# Altium footprint library Package_DFN_QFN.PcbLib: 735 footprints (part 18 of 46)
Each footprint in its own frame and in the unit in brackets; x right, y up, seen from the top. Pads: shape width x height; smd on the part's side, far side on the other; paste and mask are expansions set on the pad; w line width, h text height; cw(c..) or ccw(c..) is an arc to the next point about the centre after c.
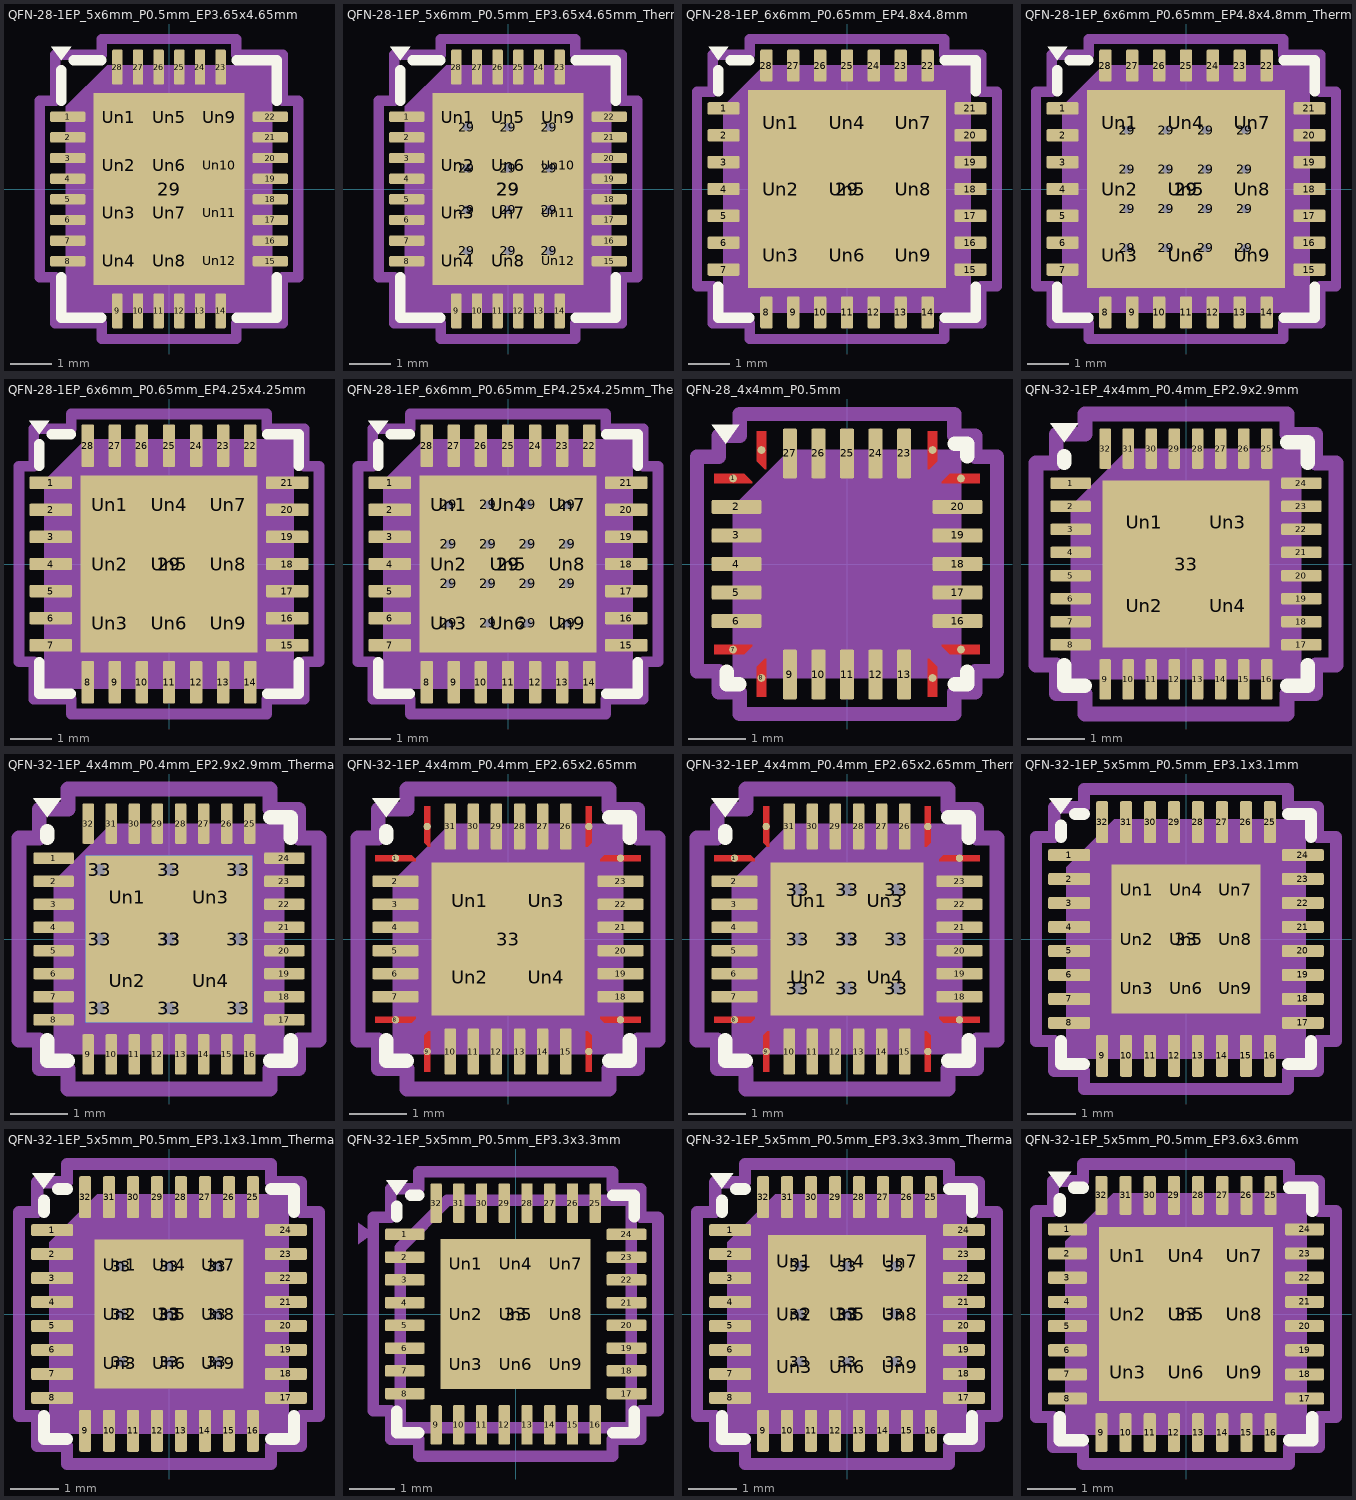
[diagram p17: the footprints below, top view; thin cyan lines are the x and y axes]

## QFN-28-1EP_5x6mm_P0.5mm_EP3.65x4.65mm [mm] "QFN-28-1EP_5x6mm_P0.5mm_EP3.65x4.65mm"
pads (41):
  rrect25% 0.85x0.25 smd: 1(-2.45,1.75) 2(-2.45,1.25) 3(-2.45,0.75) 4(-2.45,0.25) 5(-2.45,-0.25) 6(-2.45,-0.75) 7(-2.45,-1.25) 8(-2.45,-1.75) 15(2.45,-1.75) 16(2.45,-1.25) 17(2.45,-0.75) 18(2.45,-0.25) 19(2.45,0.25) 20(2.45,0.75) 21(2.45,1.25) 22(2.45,1.75)
  rrect25% 0.25x0.85 smd: 9(-1.25,-2.95) 10(-0.75,-2.95) 11(-0.25,-2.95) 12(0.25,-2.95) 13(0.75,-2.95) 14(1.25,-2.95) 23(1.25,2.95) 24(0.75,2.95) 25(0.25,2.95) 26(-0.25,2.95) 27(-0.75,2.95) 28(-1.25,2.95)
  rect 3.65x4.65 smd: 29(0,0)
  rrect25% 0.98x0.94 on Top Paste: Un1(-1.22,1.74) Un2(-1.22,0.58) Un3(-1.22,-0.58) Un4(-1.22,-1.74) Un5(0,1.74) Un6(0,0.58) Un7(0,-0.58) Un8(0,-1.74) Un9(1.22,1.74) Un10(1.22,0.58) Un11(1.22,-0.58) Un12(1.22,-1.74)
F.SilkS:
  region: -2.61,3.11 -2.85,3.44 -2.37,3.44
  lines w0.254: -2.61,-2.135 -2.61,-3.11 -1.635,-3.11 ; -2.61,2.135 -2.61,2.87 ; -2.31,3.11 -1.635,3.11 ; 1.635,-3.11 2.61,-3.11 2.61,-2.135 ; 1.635,3.11 2.61,3.11 2.61,2.135
Top Component Center:
  lines w0.127: -0.127,0 0.127,0 -0.127,0 ; 0,-0.127 0,0.127 0,-0.127
Top Assembly:
  region: 2.5,-3 -2.5,-3 -2.5,2 -1.5,3 2.5,3
Top Courtyard:
  lines w0.254: -3.13,-2.13 -2.75,-2.13 -2.75,-3.25 -1.63,-3.25 -1.63,-3.63 1.63,-3.63 1.63,-3.25 2.75,-3.25 2.75,-2.13 3.13,-2.13 3.13,2.13 2.75,2.13 2.75,3.25 1.63,3.25 1.63,3.63 -1.63,3.63 -1.63,3.25 -2.75,3.25 -2.75,2.13 -3.13,2.13 -3.13,-2.13
Top Designator:
  text ".Designator" at -3.43,-0.344 h1.52
3D body "QFN-28-1EP_5x6mm_P0.5mm_EP3.65x4.65mm.step": height 0.77, standoff 0, extent -2.5,-3 2.5,3

## QFN-28-1EP_5x6mm_P0.5mm_EP3.65x4.65mm_ThermalVias [mm] "QFN-28-1EP_5x6mm_P0.5mm_EP3.65x4.65mm_ThermalVias"
pads (54):
  rrect25% 0.85x0.25 smd: 1(-2.45,1.75) 2(-2.45,1.25) 3(-2.45,0.75) 4(-2.45,0.25) 5(-2.45,-0.25) 6(-2.45,-0.75) 7(-2.45,-1.25) 8(-2.45,-1.75) 15(2.45,-1.75) 16(2.45,-1.25) 17(2.45,-0.75) 18(2.45,-0.25) 19(2.45,0.25) 20(2.45,0.75) 21(2.45,1.25) 22(2.45,1.75)
  rrect25% 0.25x0.85 smd: 9(-1.25,-2.95) 10(-0.75,-2.95) 11(-0.25,-2.95) 12(0.25,-2.95) 13(0.75,-2.95) 14(1.25,-2.95) 23(1.25,2.95) 24(0.75,2.95) 25(0.25,2.95) 26(-0.25,2.95) 27(-0.75,2.95) 28(-1.25,2.95)
  round 0.5 hole 0.2: 29(-1,-1.5) 29(-1,-0.5) 29(-1,0.5) 29(-1,1.5) 29(0,-1.5) 29(0,-0.5) 29(0,0.5) 29(0,1.5) 29(1,-1.5) 29(1,-0.5) 29(1,0.5) 29(1,1.5)
  rect 3.65x4.65 smd: 29(0,0)
  rect 2.5x3.5 smd far side: 29(0,0)
  rrect25% 0.98x0.94 on Top Paste: Un1(-1.22,1.74) Un2(-1.22,0.58) Un3(-1.22,-0.58) Un4(-1.22,-1.74) Un5(0,1.74) Un6(0,0.58) Un7(0,-0.58) Un8(0,-1.74) Un9(1.22,1.74) Un10(1.22,0.58) Un11(1.22,-0.58) Un12(1.22,-1.74)
F.SilkS:
  region: -2.61,3.11 -2.85,3.44 -2.37,3.44
  lines w0.254: -2.61,-2.135 -2.61,-3.11 -1.635,-3.11 ; -2.61,2.135 -2.61,2.87 ; -2.31,3.11 -1.635,3.11 ; 1.635,-3.11 2.61,-3.11 2.61,-2.135 ; 1.635,3.11 2.61,3.11 2.61,2.135
Top Component Center:
  lines w0.127: -0.127,0 0.127,0 -0.127,0 ; 0,-0.127 0,0.127 0,-0.127
Top Assembly:
  region: 2.5,-3 -2.5,-3 -2.5,2 -1.5,3 2.5,3
Top Courtyard:
  lines w0.254: -3.13,-2.13 -2.75,-2.13 -2.75,-3.25 -1.63,-3.25 -1.63,-3.63 1.63,-3.63 1.63,-3.25 2.75,-3.25 2.75,-2.13 3.13,-2.13 3.13,2.13 2.75,2.13 2.75,3.25 1.63,3.25 1.63,3.63 -1.63,3.63 -1.63,3.25 -2.75,3.25 -2.75,2.13 -3.13,2.13 -3.13,-2.13
Top Designator:
  text ".Designator" at -3.43,-0.344 h1.52
3D body "QFN-28-1EP_5x6mm_P0.5mm_EP3.65x4.65mm.step": height 0.77, standoff 0, extent -2.5,-3 2.5,3

## QFN-28-1EP_6x6mm_P0.65mm_EP4.8x4.8mm [mm] "QFN-28-1EP_6x6mm_P0.65mm_EP4.8x4.8mm"
pads (38):
  rrect25% 0.775x0.3 smd: 1(-2.987,1.95) 2(-2.987,1.3) 3(-2.987,0.65) 4(-2.987,0) 5(-2.987,-0.65) 6(-2.987,-1.3) 7(-2.987,-1.95) 15(2.987,-1.95) 16(2.987,-1.3) 17(2.987,-0.65) 18(2.987,0) 19(2.987,0.65) 20(2.987,1.3) 21(2.987,1.95)
  rrect25% 0.3x0.775 smd: 8(-1.95,-2.987) 9(-1.3,-2.987) 10(-0.65,-2.987) 11(0,-2.987) 12(0.65,-2.987) 13(1.3,-2.987) 14(1.95,-2.987) 22(1.95,2.987) 23(1.3,2.987) 24(0.65,2.987) 25(0,2.987) 26(-0.65,2.987) 27(-1.3,2.987) 28(-1.95,2.987)
  rect 4.8x4.8 smd: 29(0,0)
  rrect19% 1.29x1.29 on Top Paste: Un1(-1.6,1.6) Un2(-1.6,0) Un3(-1.6,-1.6) Un4(0,1.6) Un5(0,0) Un6(0,-1.6) Un7(1.6,1.6) Un8(1.6,0) Un9(1.6,-1.6)
F.SilkS:
  region: -3.11,3.11 -3.35,3.44 -2.87,3.44
  lines w0.254: -3.11,-2.36 -3.11,-3.11 -2.36,-3.11 ; -3.11,2.36 -3.11,2.87 ; -2.81,3.11 -2.36,3.11 ; 2.36,-3.11 3.11,-3.11 3.11,-2.36 ; 2.36,3.11 3.11,3.11 3.11,2.36
Top Component Center:
  lines w0.127: -0.127,0 0.127,0 -0.127,0 ; 0,-0.127 0,0.127 0,-0.127
Top Assembly:
  region: 3,-3 -3,-3 -3,2 -2,3 3,3
Top Courtyard:
  lines w0.254: -3.63,-2.35 -3.25,-2.35 -3.25,-3.25 -2.35,-3.25 -2.35,-3.63 2.35,-3.63 2.35,-3.25 3.25,-3.25 3.25,-2.35 3.63,-2.35 3.63,2.35 3.25,2.35 3.25,3.25 2.35,3.25 2.35,3.63 -2.35,3.63 -2.35,3.25 -3.25,3.25 -3.25,2.35 -3.63,2.35 -3.63,-2.35
Top Designator:
  text ".Designator" at -3.43,-0.344 h1.52
3D body "QFN-28-1EP_6x6mm_P0.65mm_EP4.8x4.8mm.step": height 0.93, standoff 0, extent -3,-3 3,3

## QFN-28-1EP_6x6mm_P0.65mm_EP4.8x4.8mm_ThermalVias [mm] "QFN-28-1EP_6x6mm_P0.65mm_EP4.8x4.8mm_ThermalVias"
pads (55):
  rrect25% 0.775x0.3 smd: 1(-2.987,1.95) 2(-2.987,1.3) 3(-2.987,0.65) 4(-2.987,0) 5(-2.987,-0.65) 6(-2.987,-1.3) 7(-2.987,-1.95) 15(2.987,-1.95) 16(2.987,-1.3) 17(2.987,-0.65) 18(2.987,0) 19(2.987,0.65) 20(2.987,1.3) 21(2.987,1.95)
  rrect25% 0.3x0.775 smd: 8(-1.95,-2.987) 9(-1.3,-2.987) 10(-0.65,-2.987) 11(0,-2.987) 12(0.65,-2.987) 13(1.3,-2.987) 14(1.95,-2.987) 22(1.95,2.987) 23(1.3,2.987) 24(0.65,2.987) 25(0,2.987) 26(-0.65,2.987) 27(-1.3,2.987) 28(-1.95,2.987)
  round 0.5 hole 0.2: 29(-1.425,-1.425) 29(-1.425,-0.475) 29(-1.425,0.475) 29(-1.425,1.425) 29(-0.475,-1.425) 29(-0.475,-0.475) 29(-0.475,0.475) 29(-0.475,1.425) 29(0.475,-1.425) 29(0.475,-0.475) 29(0.475,0.475) 29(0.475,1.425) 29(1.425,-1.425) 29(1.425,-0.475) 29(1.425,0.475) 29(1.425,1.425)
  rect 4.8x4.8 smd: 29(0,0)
  rect 3.35x3.35 smd far side: 29(0,0)
  rrect19% 1.29x1.29 on Top Paste: Un1(-1.6,1.6) Un2(-1.6,0) Un3(-1.6,-1.6) Un4(0,1.6) Un5(0,0) Un6(0,-1.6) Un7(1.6,1.6) Un8(1.6,0) Un9(1.6,-1.6)
F.SilkS:
  region: -3.11,3.11 -3.35,3.44 -2.87,3.44
  lines w0.254: -3.11,-2.36 -3.11,-3.11 -2.36,-3.11 ; -3.11,2.36 -3.11,2.87 ; -2.81,3.11 -2.36,3.11 ; 2.36,-3.11 3.11,-3.11 3.11,-2.36 ; 2.36,3.11 3.11,3.11 3.11,2.36
Top Component Center:
  lines w0.127: -0.127,0 0.127,0 -0.127,0 ; 0,-0.127 0,0.127 0,-0.127
Top Assembly:
  region: 3,-3 -3,-3 -3,2 -2,3 3,3
Top Courtyard:
  lines w0.254: -3.63,-2.35 -3.25,-2.35 -3.25,-3.25 -2.35,-3.25 -2.35,-3.63 2.35,-3.63 2.35,-3.25 3.25,-3.25 3.25,-2.35 3.63,-2.35 3.63,2.35 3.25,2.35 3.25,3.25 2.35,3.25 2.35,3.63 -2.35,3.63 -2.35,3.25 -3.25,3.25 -3.25,2.35 -3.63,2.35 -3.63,-2.35
Top Designator:
  text ".Designator" at -3.43,-0.344 h1.52
3D body "QFN-28-1EP_6x6mm_P0.65mm_EP4.8x4.8mm.step": height 0.93, standoff 0, extent -3,-3 3,3

## QFN-28-1EP_6x6mm_P0.65mm_EP4.25x4.25mm [mm] "QFN-28-1EP_6x6mm_P0.65mm_EP4.25x4.25mm"
pads (38):
  rrect25% 1.025x0.3 smd: 1(-2.838,1.95) 2(-2.838,1.3) 3(-2.838,0.65) 4(-2.838,0) 5(-2.838,-0.65) 6(-2.838,-1.3) 7(-2.838,-1.95) 15(2.838,-1.95) 16(2.838,-1.3) 17(2.838,-0.65) 18(2.838,0) 19(2.838,0.65) 20(2.838,1.3) 21(2.838,1.95)
  rrect25% 0.3x1.025 smd: 8(-1.95,-2.838) 9(-1.3,-2.838) 10(-0.65,-2.838) 11(0,-2.838) 12(0.65,-2.838) 13(1.3,-2.838) 14(1.95,-2.838) 22(1.95,2.838) 23(1.3,2.838) 24(0.65,2.838) 25(0,2.838) 26(-0.65,2.838) 27(-1.3,2.838) 28(-1.95,2.838)
  rect 4.25x4.25 smd: 29(0,0)
  rrect22% 1.14x1.14 on Top Paste: Un1(-1.42,1.42) Un2(-1.42,0) Un3(-1.42,-1.42) Un4(0,1.42) Un5(0,0) Un6(0,-1.42) Un7(1.42,1.42) Un8(1.42,0) Un9(1.42,-1.42)
F.SilkS:
  region: -3.11,3.11 -3.35,3.44 -2.87,3.44
  lines w0.254: -3.11,-2.36 -3.11,-3.11 -2.36,-3.11 ; -3.11,2.36 -3.11,2.87 ; -2.81,3.11 -2.36,3.11 ; 2.36,-3.11 3.11,-3.11 3.11,-2.36 ; 2.36,3.11 3.11,3.11 3.11,2.36
Top Component Center:
  lines w0.127: -0.127,0 0.127,0 -0.127,0 ; 0,-0.127 0,0.127 0,-0.127
Top Assembly:
  region: 3,-3 -3,-3 -3,2 -2,3 3,3
Top Courtyard:
  lines w0.254: -3.6,-2.35 -3.6,2.35 -3.25,2.35 -3.25,3.25 -2.35,3.25 -2.35,3.6 2.35,3.6 2.35,3.25 3.25,3.25 3.25,2.35 3.6,2.35 3.6,-2.35 3.25,-2.35 3.25,-3.25 2.35,-3.25 2.35,-3.6 -2.35,-3.6 -2.35,-3.25 -3.25,-3.25 -3.25,-2.35 -3.6,-2.35
Top Designator:
  text ".Designator" at -3.43,-0.344 h1.52
3D body "QFN-28-1EP_6x6mm_P0.65mm_EP4.25x4.25mm.step": height 0.92, standoff 0, extent -3,-3 3,3

## QFN-28-1EP_6x6mm_P0.65mm_EP4.25x4.25mm_ThermalVias [mm] "QFN-28-1EP_6x6mm_P0.65mm_EP4.25x4.25mm_ThermalVias"
pads (55):
  rrect25% 1.025x0.3 smd: 1(-2.838,1.95) 2(-2.838,1.3) 3(-2.838,0.65) 4(-2.838,0) 5(-2.838,-0.65) 6(-2.838,-1.3) 7(-2.838,-1.95) 15(2.838,-1.95) 16(2.838,-1.3) 17(2.838,-0.65) 18(2.838,0) 19(2.838,0.65) 20(2.838,1.3) 21(2.838,1.95)
  rrect25% 0.3x1.025 smd: 8(-1.95,-2.838) 9(-1.3,-2.838) 10(-0.65,-2.838) 11(0,-2.838) 12(0.65,-2.838) 13(1.3,-2.838) 14(1.95,-2.838) 22(1.95,2.838) 23(1.3,2.838) 24(0.65,2.838) 25(0,2.838) 26(-0.65,2.838) 27(-1.3,2.838) 28(-1.95,2.838)
  round 0.5 hole 0.2: 29(-1.425,-1.425) 29(-1.425,-0.475) 29(-1.425,0.475) 29(-1.425,1.425) 29(-0.475,-1.425) 29(-0.475,-0.475) 29(-0.475,0.475) 29(-0.475,1.425) 29(0.475,-1.425) 29(0.475,-0.475) 29(0.475,0.475) 29(0.475,1.425) 29(1.425,-1.425) 29(1.425,-0.475) 29(1.425,0.475) 29(1.425,1.425)
  rect 4.25x4.25 smd: 29(0,0)
  rect 3.35x3.35 smd far side: 29(0,0)
  rrect22% 1.14x1.14 on Top Paste: Un1(-1.42,1.42) Un2(-1.42,0) Un3(-1.42,-1.42) Un4(0,1.42) Un5(0,0) Un6(0,-1.42) Un7(1.42,1.42) Un8(1.42,0) Un9(1.42,-1.42)
F.SilkS:
  region: -3.11,3.11 -3.35,3.44 -2.87,3.44
  lines w0.254: -3.11,-2.36 -3.11,-3.11 -2.36,-3.11 ; -3.11,2.36 -3.11,2.87 ; -2.81,3.11 -2.36,3.11 ; 2.36,-3.11 3.11,-3.11 3.11,-2.36 ; 2.36,3.11 3.11,3.11 3.11,2.36
Top Component Center:
  lines w0.127: -0.127,0 0.127,0 -0.127,0 ; 0,-0.127 0,0.127 0,-0.127
Top Assembly:
  region: 3,-3 -3,-3 -3,2 -2,3 3,3
Top Courtyard:
  lines w0.254: -3.6,-2.35 -3.25,-2.35 -3.25,-3.25 -2.35,-3.25 -2.35,-3.6 2.35,-3.6 2.35,-3.25 3.25,-3.25 3.25,-2.35 3.6,-2.35 3.6,2.35 3.25,2.35 3.25,3.25 2.35,3.25 2.35,3.6 -2.35,3.6 -2.35,3.25 -3.25,3.25 -3.25,2.35 -3.6,2.35 -3.6,-2.35
Top Designator:
  text ".Designator" at -3.43,-0.344 h1.52
3D body "QFN-28-1EP_6x6mm_P0.65mm_EP4.25x4.25mm.step": height 0.92, standoff 0, extent -3,-3 3,3

## QFN-28_4x4mm_P0.5mm [mm] "QFN-28_4x4mm_P0.5mm"
pads (28):
  round 0.137 smd: 1(-1.997,1.5) 7(-1.997,-1.5) 8(-1.5,-1.997) 14(1.5,-1.997) 15(1.997,-1.5) 21(1.997,1.5) 22(1.5,1.997) 28(-1.5,1.997)
  rrect25% 0.875x0.25 smd: 2(-1.937,1) 3(-1.937,0.5) 4(-1.937,0) 5(-1.937,-0.5) 6(-1.937,-1) 16(1.937,-1) 17(1.937,-0.5) 18(1.937,0) 19(1.937,0.5) 20(1.937,1)
  rrect25% 0.25x0.875 smd: 9(-1,-1.937) 10(-0.5,-1.937) 11(0,-1.937) 12(0.5,-1.937) 13(1,-1.937) 23(1,1.937) 24(0.5,1.937) 25(0,1.937) 26(-0.5,1.937) 27(-1,1.937)
F.Cu:
  region: -1.665,1.446 -1.665,1.42 -2.33,1.42 -2.33,1.58 -1.799,1.58
  region: -1.665,-1.446 -1.799,-1.58 -2.33,-1.58 -2.33,-1.42 -1.665,-1.42
  region: -1.42,-2.33 -1.58,-2.33 -1.58,-1.799 -1.446,-1.665 -1.42,-1.665
  region: 1.58,-1.799 1.58,-2.33 1.42,-2.33 1.42,-1.665 1.446,-1.665
  region: 2.33,-1.58 1.799,-1.58 1.665,-1.446 1.665,-1.42 2.33,-1.42
  region: 2.33,1.42 1.665,1.42 1.665,1.446 1.799,1.58 2.33,1.58
  region: 1.58,1.799 1.446,1.665 1.42,1.665 1.42,2.33 1.58,2.33
  region: -1.42,1.665 -1.446,1.665 -1.58,1.799 -1.58,2.33 -1.42,2.33
F.SilkS:
  region: -2.13,2.11 -2.37,2.44 -1.89,2.44
  lines w0.254: -2.11,-1.885 -2.11,-2.11 -1.885,-2.11 ; 1.885,-2.11 2.11,-2.11 2.11,-1.885 ; 1.885,2.11 2.11,2.11 2.11,1.885
F.Paste:
  region: -1.665,1.446 -1.665,1.42 -2.33,1.42 -2.33,1.58 -1.799,1.58
  region: -1.665,-1.446 -1.799,-1.58 -2.33,-1.58 -2.33,-1.42 -1.665,-1.42
  region: -1.42,-2.33 -1.58,-2.33 -1.58,-1.799 -1.446,-1.665 -1.42,-1.665
  region: 1.58,-1.799 1.58,-2.33 1.42,-2.33 1.42,-1.665 1.446,-1.665
  region: 2.33,-1.58 1.799,-1.58 1.665,-1.446 1.665,-1.42 2.33,-1.42
  region: 2.33,1.42 1.665,1.42 1.665,1.446 1.799,1.58 2.33,1.58
  region: 1.58,1.799 1.446,1.665 1.42,1.665 1.42,2.33 1.58,2.33
  region: -1.42,1.665 -1.446,1.665 -1.58,1.799 -1.58,2.33 -1.42,2.33
F.Mask:
  region: -1.665,1.446 -1.665,1.42 -2.33,1.42 -2.33,1.58 -1.799,1.58
  region: -1.665,-1.446 -1.799,-1.58 -2.33,-1.58 -2.33,-1.42 -1.665,-1.42
  region: -1.42,-2.33 -1.58,-2.33 -1.58,-1.799 -1.446,-1.665 -1.42,-1.665
  region: 1.58,-1.799 1.58,-2.33 1.42,-2.33 1.42,-1.665 1.446,-1.665
  region: 2.33,-1.58 1.799,-1.58 1.665,-1.446 1.665,-1.42 2.33,-1.42
  region: 2.33,1.42 1.665,1.42 1.665,1.446 1.799,1.58 2.33,1.58
  region: 1.58,1.799 1.446,1.665 1.42,1.665 1.42,2.33 1.58,2.33
  region: -1.42,1.665 -1.446,1.665 -1.58,1.799 -1.58,2.33 -1.42,2.33
Top Component Center:
  lines w0.127: -0.127,0 0.127,0 -0.127,0 ; 0,-0.127 0,0.127 0,-0.127
Top Assembly:
  region: 2,-2 -2,-2 -2,1 -1,2 2,2
Top Courtyard:
  lines w0.254: -2.63,-1.88 -2.63,1.88 -2.25,1.88 -2.25,2.25 -1.88,2.25 -1.88,2.63 1.88,2.63 1.88,2.25 2.25,2.25 2.25,1.88 2.63,1.88 2.63,-1.88 2.25,-1.88 2.25,-2.25 1.88,-2.25 1.88,-2.63 -1.88,-2.63 -1.88,-2.25 -2.25,-2.25 -2.25,-1.88 -2.63,-1.88
Top Designator:
  text ".Designator" at -3.43,-0.344 h1.52

## QFN-32-1EP_4x4mm_P0.4mm_EP2.9x2.9mm [mm] "QFN-32-1EP_4x4mm_P0.4mm_EP2.9x2.9mm"
pads (37):
  rrect25% 0.7x0.2 smd: 1(-2,1.4) 2(-2,1) 3(-2,0.6) 4(-2,0.2) 5(-2,-0.2) 6(-2,-0.6) 7(-2,-1) 8(-2,-1.4) 17(2,-1.4) 18(2,-1) 19(2,-0.6) 20(2,-0.2) 21(2,0.2) 22(2,0.6) 23(2,1) 24(2,1.4)
  rrect25% 0.2x0.7 smd: 9(-1.4,-2) 10(-1,-2) 11(-0.6,-2) 12(-0.2,-2) 13(0.2,-2) 14(0.6,-2) 15(1,-2) 16(1.4,-2) 25(1.4,2) 26(1,2) 27(0.6,2) 28(0.2,2) 29(-0.2,2) 30(-0.6,2) 31(-1,2) 32(-1.4,2)
  rect 2.9x2.9 smd: 33(0,0)
  rrect21% 1.17x1.17 on Top Paste: Un1(-0.725,0.725) Un2(-0.725,-0.725) Un3(0.725,0.725) Un4(0.725,-0.725)
F.SilkS:
  region: -2.11,2.11 -2.35,2.44 -1.87,2.44
  lines w0.254: -2.11,-1.76 -2.11,-2.11 -1.76,-2.11 ; -2.11,1.76 -2.11,1.87 ; 1.76,-2.11 2.11,-2.11 2.11,-1.76 ; 1.76,2.11 2.11,2.11 2.11,1.76
Top Component Center:
  lines w0.127: -0.127,0 0.127,0 -0.127,0 ; 0,-0.127 0,0.127 0,-0.127
Top Assembly:
  region: 2,-2 -2,-2 -2,1 -1,2 2,2
Top Courtyard:
  lines w0.254: -2.6,-1.75 -2.6,1.75 -2.25,1.75 -2.25,2.25 -1.75,2.25 -1.75,2.6 1.75,2.6 1.75,2.25 2.25,2.25 2.25,1.75 2.6,1.75 2.6,-1.75 2.25,-1.75 2.25,-2.25 1.75,-2.25 1.75,-2.6 -1.75,-2.6 -1.75,-2.25 -2.25,-2.25 -2.25,-1.75 -2.6,-1.75
Top Designator:
  text ".Designator" at -3.43,-0.344 h1.52
3D body "QFN-32-1EP_4x4mm_P0.4mm_EP2.65x2.65mm.step": height 0.92, standoff 0, extent -2,-2 2,2

## QFN-32-1EP_4x4mm_P0.4mm_EP2.9x2.9mm_ThermalVias [mm] "QFN-32-1EP_4x4mm_P0.4mm_EP2.9x2.9mm_ThermalVias"
pads (47):
  rrect25% 0.7x0.2 smd: 1(-2,1.4) 2(-2,1) 3(-2,0.6) 4(-2,0.2) 5(-2,-0.2) 6(-2,-0.6) 7(-2,-1) 8(-2,-1.4) 17(2,-1.4) 18(2,-1) 19(2,-0.6) 20(2,-0.2) 21(2,0.2) 22(2,0.6) 23(2,1) 24(2,1.4)
  rrect25% 0.2x0.7 smd: 9(-1.4,-2) 10(-1,-2) 11(-0.6,-2) 12(-0.2,-2) 13(0.2,-2) 14(0.6,-2) 15(1,-2) 16(1.4,-2) 25(1.4,2) 26(1,2) 27(0.6,2) 28(0.2,2) 29(-0.2,2) 30(-0.6,2) 31(-1,2) 32(-1.4,2)
  round 0.5 hole 0.2: 33(-1.2,-1.2) 33(-1.2,0) 33(-1.2,1.2) 33(0,-1.2) 33(0,0) 33(0,1.2) 33(1.2,-1.2) 33(1.2,0) 33(1.2,1.2)
  rect 2.9x2.9 smd: 33(0,0)
  rect 2.9x2.9 smd far side: 33(0,0)
  rrect20% 1.26x1.26 on Top Paste: Un1(-0.725,0.725) Un2(-0.725,-0.725) Un3(0.725,0.725) Un4(0.725,-0.725)
F.SilkS:
  region: -2.11,2.11 -2.35,2.44 -1.87,2.44
  lines w0.254: -2.11,-1.76 -2.11,-2.11 -1.76,-2.11 ; -2.11,1.76 -2.11,1.87 ; 1.76,-2.11 2.11,-2.11 2.11,-1.76 ; 1.76,2.11 2.11,2.11 2.11,1.76
Top Component Center:
  lines w0.127: -0.127,0 0.127,0 -0.127,0 ; 0,-0.127 0,0.127 0,-0.127
Top Assembly:
  region: 2,-2 -2,-2 -2,1 -1,2 2,2
Top Courtyard:
  lines w0.254: -2.6,-1.75 -2.6,1.75 -2.25,1.75 -2.25,2.25 -1.75,2.25 -1.75,2.6 1.75,2.6 1.75,2.25 2.25,2.25 2.25,1.75 2.6,1.75 2.6,-1.75 2.25,-1.75 2.25,-2.25 1.75,-2.25 1.75,-2.6 -1.75,-2.6 -1.75,-2.25 -2.25,-2.25 -2.25,-1.75 -2.6,-1.75
Top Designator:
  text ".Designator" at -3.43,-0.344 h1.52
3D body "QFN-32-1EP_4x4mm_P0.4mm_EP2.65x2.65mm.step": height 0.92, standoff 0, extent -2,-2 2,2

## QFN-32-1EP_4x4mm_P0.4mm_EP2.65x2.65mm [mm] "QFN-32-1EP_4x4mm_P0.4mm_EP2.65x2.65mm"
pads (37):
  round 0.129 smd: 1(-1.95,1.4) 8(-1.95,-1.4) 9(-1.4,-1.95) 16(1.4,-1.95) 17(1.95,-1.4) 24(1.95,1.4) 25(1.4,1.95) 32(-1.4,1.95)
  rrect25% 0.8x0.2 smd: 2(-1.95,1) 3(-1.95,0.6) 4(-1.95,0.2) 5(-1.95,-0.2) 6(-1.95,-0.6) 7(-1.95,-1) 18(1.95,-1) 19(1.95,-0.6) 20(1.95,-0.2) 21(1.95,0.2) 22(1.95,0.6) 23(1.95,1)
  rrect25% 0.2x0.8 smd: 10(-1,-1.95) 11(-0.6,-1.95) 12(-0.2,-1.95) 13(0.2,-1.95) 14(0.6,-1.95) 15(1,-1.95) 26(1,1.95) 27(0.6,1.95) 28(0.2,1.95) 29(-0.2,1.95) 30(-0.6,1.95) 31(-1,1.95)
  rect 2.65x2.65 smd: 33(0,0)
  rrect23% 1.07x1.07 on Top Paste: Un1(-0.66,0.66) Un2(-0.66,-0.66) Un3(0.66,0.66) Un4(0.66,-0.66)
F.Cu:
  region: -1.6,1.379 -1.6,1.35 -2.3,1.35 -2.3,1.45 -1.671,1.45
  region: -1.6,-1.379 -1.671,-1.45 -2.3,-1.45 -2.3,-1.35 -1.6,-1.35
  region: -1.35,-2.3 -1.45,-2.3 -1.45,-1.671 -1.379,-1.6 -1.35,-1.6
  region: 1.45,-1.671 1.45,-2.3 1.35,-2.3 1.35,-1.6 1.379,-1.6
  region: 2.3,-1.45 1.671,-1.45 1.6,-1.379 1.6,-1.35 2.3,-1.35
  region: 2.3,1.35 1.6,1.35 1.6,1.379 1.671,1.45 2.3,1.45
  region: 1.45,1.671 1.379,1.6 1.35,1.6 1.35,2.3 1.45,2.3
  region: -1.35,1.6 -1.379,1.6 -1.45,1.671 -1.45,2.3 -1.35,2.3
F.SilkS:
  region: -2.11,2.11 -2.35,2.44 -1.87,2.44
  lines w0.254: -2.11,-1.76 -2.11,-2.11 -1.76,-2.11 ; -2.11,1.76 -2.11,1.87 ; 1.76,-2.11 2.11,-2.11 2.11,-1.76 ; 1.76,2.11 2.11,2.11 2.11,1.76
F.Paste:
  region: -1.6,1.379 -1.6,1.35 -2.3,1.35 -2.3,1.45 -1.671,1.45
  region: -1.6,-1.379 -1.671,-1.45 -2.3,-1.45 -2.3,-1.35 -1.6,-1.35
  region: -1.35,-2.3 -1.45,-2.3 -1.45,-1.671 -1.379,-1.6 -1.35,-1.6
  region: 1.45,-1.671 1.45,-2.3 1.35,-2.3 1.35,-1.6 1.379,-1.6
  region: 2.3,-1.45 1.671,-1.45 1.6,-1.379 1.6,-1.35 2.3,-1.35
  region: 2.3,1.35 1.6,1.35 1.6,1.379 1.671,1.45 2.3,1.45
  region: 1.45,1.671 1.379,1.6 1.35,1.6 1.35,2.3 1.45,2.3
  region: -1.35,1.6 -1.379,1.6 -1.45,1.671 -1.45,2.3 -1.35,2.3
F.Mask:
  region: -1.6,1.379 -1.6,1.35 -2.3,1.35 -2.3,1.45 -1.671,1.45
  region: -1.6,-1.379 -1.671,-1.45 -2.3,-1.45 -2.3,-1.35 -1.6,-1.35
  region: -1.35,-2.3 -1.45,-2.3 -1.45,-1.671 -1.379,-1.6 -1.35,-1.6
  region: 1.45,-1.671 1.45,-2.3 1.35,-2.3 1.35,-1.6 1.379,-1.6
  region: 2.3,-1.45 1.671,-1.45 1.6,-1.379 1.6,-1.35 2.3,-1.35
  region: 2.3,1.35 1.6,1.35 1.6,1.379 1.671,1.45 2.3,1.45
  region: 1.45,1.671 1.379,1.6 1.35,1.6 1.35,2.3 1.45,2.3
  region: -1.35,1.6 -1.379,1.6 -1.45,1.671 -1.45,2.3 -1.35,2.3
Top Component Center:
  lines w0.127: -0.127,0 0.127,0 -0.127,0 ; 0,-0.127 0,0.127 0,-0.127
Top Assembly:
  region: 2,-2 -2,-2 -2,1 -1,2 2,2
Top Courtyard:
  lines w0.254: -2.6,-1.75 -2.6,1.75 -2.25,1.75 -2.25,2.25 -1.75,2.25 -1.75,2.6 1.75,2.6 1.75,2.25 2.25,2.25 2.25,1.75 2.6,1.75 2.6,-1.75 2.25,-1.75 2.25,-2.25 1.75,-2.25 1.75,-2.6 -1.75,-2.6 -1.75,-2.25 -2.25,-2.25 -2.25,-1.75 -2.6,-1.75
Top Designator:
  text ".Designator" at -3.43,-0.344 h1.52
3D body "QFN-32-1EP_4x4mm_P0.4mm_EP2.65x2.65mm.step": height 0.92, standoff 0, extent -2,-2 2,2

## QFN-32-1EP_4x4mm_P0.4mm_EP2.65x2.65mm_ThermalVias [mm] "QFN-32-1EP_4x4mm_P0.4mm_EP2.65x2.65mm_ThermalVias"
pads (47):
  round 0.129 smd: 1(-1.95,1.4) 8(-1.95,-1.4) 9(-1.4,-1.95) 16(1.4,-1.95) 17(1.95,-1.4) 24(1.95,1.4) 25(1.4,1.95) 32(-1.4,1.95)
  rrect25% 0.8x0.2 smd: 2(-1.95,1) 3(-1.95,0.6) 4(-1.95,0.2) 5(-1.95,-0.2) 6(-1.95,-0.6) 7(-1.95,-1) 18(1.95,-1) 19(1.95,-0.6) 20(1.95,-0.2) 21(1.95,0.2) 22(1.95,0.6) 23(1.95,1)
  rrect25% 0.2x0.8 smd: 10(-1,-1.95) 11(-0.6,-1.95) 12(-0.2,-1.95) 13(0.2,-1.95) 14(0.6,-1.95) 15(1,-1.95) 26(1,1.95) 27(0.6,1.95) 28(0.2,1.95) 29(-0.2,1.95) 30(-0.6,1.95) 31(-1,1.95)
  round 0.5 hole 0.2: 33(-0.85,-0.85) 33(-0.85,0) 33(-0.85,0.85) 33(0,-0.85) 33(0,0) 33(0,0.85) 33(0.85,-0.85) 33(0.85,0) 33(0.85,0.85)
  rect 2.65x2.65 smd: 33(0,0)
  rect 2.2x2.2 smd far side: 33(0,0)
  rrect23% 1.07x1.07 on Top Paste: Un1(-0.66,0.66) Un2(-0.66,-0.66) Un3(0.66,0.66) Un4(0.66,-0.66)
F.Cu:
  region: -1.6,1.379 -1.6,1.35 -2.3,1.35 -2.3,1.45 -1.671,1.45
  region: -1.6,-1.379 -1.671,-1.45 -2.3,-1.45 -2.3,-1.35 -1.6,-1.35
  region: -1.35,-2.3 -1.45,-2.3 -1.45,-1.671 -1.379,-1.6 -1.35,-1.6
  region: 1.45,-1.671 1.45,-2.3 1.35,-2.3 1.35,-1.6 1.379,-1.6
  region: 2.3,-1.45 1.671,-1.45 1.6,-1.379 1.6,-1.35 2.3,-1.35
  region: 2.3,1.35 1.6,1.35 1.6,1.379 1.671,1.45 2.3,1.45
  region: 1.45,1.671 1.379,1.6 1.35,1.6 1.35,2.3 1.45,2.3
  region: -1.35,1.6 -1.379,1.6 -1.45,1.671 -1.45,2.3 -1.35,2.3
F.SilkS:
  region: -2.11,2.11 -2.35,2.44 -1.87,2.44
  lines w0.254: -2.11,-1.76 -2.11,-2.11 -1.76,-2.11 ; -2.11,1.76 -2.11,1.87 ; 1.76,-2.11 2.11,-2.11 2.11,-1.76 ; 1.76,2.11 2.11,2.11 2.11,1.76
F.Paste:
  region: -1.6,1.379 -1.6,1.35 -2.3,1.35 -2.3,1.45 -1.671,1.45
  region: -1.6,-1.379 -1.671,-1.45 -2.3,-1.45 -2.3,-1.35 -1.6,-1.35
  region: -1.35,-2.3 -1.45,-2.3 -1.45,-1.671 -1.379,-1.6 -1.35,-1.6
  region: 1.45,-1.671 1.45,-2.3 1.35,-2.3 1.35,-1.6 1.379,-1.6
  region: 2.3,-1.45 1.671,-1.45 1.6,-1.379 1.6,-1.35 2.3,-1.35
  region: 2.3,1.35 1.6,1.35 1.6,1.379 1.671,1.45 2.3,1.45
  region: 1.45,1.671 1.379,1.6 1.35,1.6 1.35,2.3 1.45,2.3
  region: -1.35,1.6 -1.379,1.6 -1.45,1.671 -1.45,2.3 -1.35,2.3
F.Mask:
  region: -1.6,1.379 -1.6,1.35 -2.3,1.35 -2.3,1.45 -1.671,1.45
  region: -1.6,-1.379 -1.671,-1.45 -2.3,-1.45 -2.3,-1.35 -1.6,-1.35
  region: -1.35,-2.3 -1.45,-2.3 -1.45,-1.671 -1.379,-1.6 -1.35,-1.6
  region: 1.45,-1.671 1.45,-2.3 1.35,-2.3 1.35,-1.6 1.379,-1.6
  region: 2.3,-1.45 1.671,-1.45 1.6,-1.379 1.6,-1.35 2.3,-1.35
  region: 2.3,1.35 1.6,1.35 1.6,1.379 1.671,1.45 2.3,1.45
  region: 1.45,1.671 1.379,1.6 1.35,1.6 1.35,2.3 1.45,2.3
  region: -1.35,1.6 -1.379,1.6 -1.45,1.671 -1.45,2.3 -1.35,2.3
Top Component Center:
  lines w0.127: -0.127,0 0.127,0 -0.127,0 ; 0,-0.127 0,0.127 0,-0.127
Top Assembly:
  region: 2,-2 -2,-2 -2,1 -1,2 2,2
Top Courtyard:
  lines w0.254: -2.6,-1.75 -2.6,1.75 -2.25,1.75 -2.25,2.25 -1.75,2.25 -1.75,2.6 1.75,2.6 1.75,2.25 2.25,2.25 2.25,1.75 2.6,1.75 2.6,-1.75 2.25,-1.75 2.25,-2.25 1.75,-2.25 1.75,-2.6 -1.75,-2.6 -1.75,-2.25 -2.25,-2.25 -2.25,-1.75 -2.6,-1.75
Top Designator:
  text ".Designator" at -3.43,-0.344 h1.52
3D body "QFN-32-1EP_4x4mm_P0.4mm_EP2.65x2.65mm.step": height 0.92, standoff 0, extent -2,-2 2,2

## QFN-32-1EP_5x5mm_P0.5mm_EP3.1x3.1mm [mm] "QFN-32-1EP_5x5mm_P0.5mm_EP3.1x3.1mm"
pads (42):
  rrect25% 0.875x0.25 smd: 1(-2.438,1.75) 2(-2.438,1.25) 3(-2.438,0.75) 4(-2.438,0.25) 5(-2.438,-0.25) 6(-2.438,-0.75) 7(-2.438,-1.25) 8(-2.438,-1.75) 17(2.438,-1.75) 18(2.438,-1.25) 19(2.438,-0.75) 20(2.438,-0.25) 21(2.438,0.25) 22(2.438,0.75) 23(2.438,1.25) 24(2.438,1.75)
  rrect25% 0.25x0.875 smd: 9(-1.75,-2.438) 10(-1.25,-2.438) 11(-0.75,-2.438) 12(-0.25,-2.438) 13(0.25,-2.438) 14(0.75,-2.438) 15(1.25,-2.438) 16(1.75,-2.438) 25(1.75,2.438) 26(1.25,2.438) 27(0.75,2.438) 28(0.25,2.438) 29(-0.25,2.438) 30(-0.75,2.438) 31(-1.25,2.438) 32(-1.75,2.438)
  rect 3.1x3.1 smd: 33(0,0)
  rrect25% 0.83x0.83 on Top Paste: Un1(-1.03,1.03) Un2(-1.03,0) Un3(-1.03,-1.03) Un4(0,1.03) Un5(0,0) Un6(0,-1.03) Un7(1.03,1.03) Un8(1.03,0) Un9(1.03,-1.03)
F.SilkS:
  region: -2.61,2.61 -2.85,2.94 -2.37,2.94
  lines w0.254: -2.61,-2.135 -2.61,-2.61 -2.135,-2.61 ; -2.61,2.135 -2.61,2.37 ; -2.31,2.61 -2.135,2.61 ; 2.135,-2.61 2.61,-2.61 2.61,-2.135 ; 2.135,2.61 2.61,2.61 2.61,2.135
Top Component Center:
  lines w0.127: -0.127,0 0.127,0 -0.127,0 ; 0,-0.127 0,0.127 0,-0.127
Top Assembly:
  region: 2.5,-2.5 -2.5,-2.5 -2.5,1.5 -1.5,2.5 2.5,2.5
Top Courtyard:
  lines w0.254: -3.13,-2.13 -2.75,-2.13 -2.75,-2.75 -2.13,-2.75 -2.13,-3.13 2.13,-3.13 2.13,-2.75 2.75,-2.75 2.75,-2.13 3.13,-2.13 3.13,2.13 2.75,2.13 2.75,2.75 2.13,2.75 2.13,3.13 -2.13,3.13 -2.13,2.75 -2.75,2.75 -2.75,2.13 -3.13,2.13 -3.13,-2.13
Top Designator:
  text ".Designator" at -3.43,-0.344 h1.52
3D body "QFN-32-1EP_5x5mm_P0.5mm_EP3.3x3.3mm.step": height 0.87, standoff 0, extent -2.5,-2.5 2.5,2.5

## QFN-32-1EP_5x5mm_P0.5mm_EP3.1x3.1mm_ThermalVias [mm] "QFN-32-1EP_5x5mm_P0.5mm_EP3.1x3.1mm_ThermalVias"
pads (52):
  rrect25% 0.875x0.25 smd: 1(-2.438,1.75) 2(-2.438,1.25) 3(-2.438,0.75) 4(-2.438,0.25) 5(-2.438,-0.25) 6(-2.438,-0.75) 7(-2.438,-1.25) 8(-2.438,-1.75) 17(2.438,-1.75) 18(2.438,-1.25) 19(2.438,-0.75) 20(2.438,-0.25) 21(2.438,0.25) 22(2.438,0.75) 23(2.438,1.25) 24(2.438,1.75)
  rrect25% 0.25x0.875 smd: 9(-1.75,-2.438) 10(-1.25,-2.438) 11(-0.75,-2.438) 12(-0.25,-2.438) 13(0.25,-2.438) 14(0.75,-2.438) 15(1.25,-2.438) 16(1.75,-2.438) 25(1.75,2.438) 26(1.25,2.438) 27(0.75,2.438) 28(0.25,2.438) 29(-0.25,2.438) 30(-0.75,2.438) 31(-1.25,2.438) 32(-1.75,2.438)
  round 0.5 hole 0.2: 33(-1,-1) 33(-1,0) 33(-1,1) 33(0,-1) 33(0,0) 33(0,1) 33(1,-1) 33(1,0) 33(1,1)
  rect 3.1x3.1 smd: 33(0,0)
  rect 2.5x2.5 smd far side: 33(0,0)
  rrect25% 0.83x0.83 on Top Paste: Un1(-1.03,1.03) Un2(-1.03,0) Un3(-1.03,-1.03) Un4(0,1.03) Un5(0,0) Un6(0,-1.03) Un7(1.03,1.03) Un8(1.03,0) Un9(1.03,-1.03)
F.SilkS:
  region: -2.61,2.61 -2.85,2.94 -2.37,2.94
  lines w0.254: -2.61,-2.135 -2.61,-2.61 -2.135,-2.61 ; -2.61,2.135 -2.61,2.37 ; -2.31,2.61 -2.135,2.61 ; 2.135,-2.61 2.61,-2.61 2.61,-2.135 ; 2.135,2.61 2.61,2.61 2.61,2.135
Top Component Center:
  lines w0.127: -0.127,0 0.127,0 -0.127,0 ; 0,-0.127 0,0.127 0,-0.127
Top Assembly:
  region: 2.5,-2.5 -2.5,-2.5 -2.5,1.5 -1.5,2.5 2.5,2.5
Top Courtyard:
  lines w0.254: -3.13,-2.13 -3.13,2.13 -2.75,2.13 -2.75,2.75 -2.13,2.75 -2.13,3.13 2.13,3.13 2.13,2.75 2.75,2.75 2.75,2.13 3.13,2.13 3.13,-2.13 2.75,-2.13 2.75,-2.75 2.13,-2.75 2.13,-3.13 -2.13,-3.13 -2.13,-2.75 -2.75,-2.75 -2.75,-2.13 -3.13,-2.13
Top Designator:
  text ".Designator" at -3.43,-0.344 h1.52
3D body "QFN-32-1EP_5x5mm_P0.5mm_EP3.3x3.3mm.step": height 0.87, standoff 0, extent -2.5,-2.5 2.5,2.5

## QFN-32-1EP_5x5mm_P0.5mm_EP3.3x3.3mm [mm] "QFN-32-1EP_5x5mm_P0.5mm_EP3.3x3.3mm"
pads (42):
  rrect25% 0.875x0.25 smd: 1(-2.438,1.75) 2(-2.438,1.25) 3(-2.438,0.75) 4(-2.438,0.25) 5(-2.438,-0.25) 6(-2.438,-0.75) 7(-2.438,-1.25) 8(-2.438,-1.75) 17(2.438,-1.75) 18(2.438,-1.25) 19(2.438,-0.75) 20(2.438,-0.25) 21(2.438,0.25) 22(2.438,0.75) 23(2.438,1.25) 24(2.438,1.75)
  rrect25% 0.25x0.875 smd: 9(-1.75,-2.438) 10(-1.25,-2.438) 11(-0.75,-2.438) 12(-0.25,-2.438) 13(0.25,-2.438) 14(0.75,-2.438) 15(1.25,-2.438) 16(1.75,-2.438) 25(1.75,2.438) 26(1.25,2.438) 27(0.75,2.438) 28(0.25,2.438) 29(-0.25,2.438) 30(-0.75,2.438) 31(-1.25,2.438) 32(-1.75,2.438)
  rect 3.3x3.3 smd: 33(0,0)
  rrect25% 0.89x0.89 on Top Paste: Un1(-1.1,1.1) Un2(-1.1,0) Un3(-1.1,-1.1) Un4(0,1.1) Un5(0,0) Un6(0,-1.1) Un7(1.1,1.1) Un8(1.1,0) Un9(1.1,-1.1)
F.SilkS:
  region: -2.61,2.61 -2.85,2.94 -2.37,2.94
  lines w0.254: -2.61,-2.135 -2.61,-2.61 -2.135,-2.61 ; -2.61,2.135 -2.61,2.37 ; -2.31,2.61 -2.135,2.61 ; 2.135,-2.61 2.61,-2.61 2.61,-2.135 ; 2.135,2.61 2.61,2.61 2.61,2.135
Top Component Center:
  lines w0.127: -0.127,0 0.127,0 -0.127,0 ; 0,-0.127 0,0.127 0,-0.127
Top Assembly:
  region: -3.137,1.771 -3.467,1.531 -3.467,2.011
  lines w0.254: -2.54,-2.46 -2.5,-2.5 2.5,-2.5 2.54,-2.46 2.54,2.46 2.5,2.5 -1.5,2.5 -2.54,1.46 -2.54,-2.286 -2.54,-2.46
Top Courtyard:
  lines w0.254: -3.13,-2.13 -2.75,-2.13 -2.75,-2.75 -2.13,-2.75 -2.13,-3.13 2.13,-3.13 2.13,-2.75 2.75,-2.75 2.75,-2.13 3.13,-2.13 3.13,2.13 2.75,2.13 2.75,2.75 2.13,2.75 2.13,3.13 -2.13,3.13 -2.13,2.75 -2.75,2.75 -2.75,2.13 -3.13,2.13 -3.13,-2.13
Top Designator:
  text ".Designator" at -3.43,-0.344 h1.52
3D body "QFN-32-1EP_5x5mm_P0.5mm_EP3.3x3.3mm.step": height 0.87, standoff 0, extent -2.5,-2.5 2.5,2.5

## QFN-32-1EP_5x5mm_P0.5mm_EP3.3x3.3mm_ThermalVias [mm] "QFN-32-1EP_5x5mm_P0.5mm_EP3.3x3.3mm_ThermalVias"
pads (52):
  rrect25% 0.875x0.25 smd: 1(-2.438,1.75) 2(-2.438,1.25) 3(-2.438,0.75) 4(-2.438,0.25) 5(-2.438,-0.25) 6(-2.438,-0.75) 7(-2.438,-1.25) 8(-2.438,-1.75) 17(2.438,-1.75) 18(2.438,-1.25) 19(2.438,-0.75) 20(2.438,-0.25) 21(2.438,0.25) 22(2.438,0.75) 23(2.438,1.25) 24(2.438,1.75)
  rrect25% 0.25x0.875 smd: 9(-1.75,-2.438) 10(-1.25,-2.438) 11(-0.75,-2.438) 12(-0.25,-2.438) 13(0.25,-2.438) 14(0.75,-2.438) 15(1.25,-2.438) 16(1.75,-2.438) 25(1.75,2.438) 26(1.25,2.438) 27(0.75,2.438) 28(0.25,2.438) 29(-0.25,2.438) 30(-0.75,2.438) 31(-1.25,2.438) 32(-1.75,2.438)
  round 0.5 hole 0.2: 33(-1,-1) 33(-1,0) 33(-1,1) 33(0,-1) 33(0,0) 33(0,1) 33(1,-1) 33(1,0) 33(1,1)
  rect 3.3x3.3 smd: 33(0,0)
  rect 2.5x2.5 smd far side: 33(0,0)
  rrect25% 0.89x0.89 on Top Paste: Un1(-1.1,1.1) Un2(-1.1,0) Un3(-1.1,-1.1) Un4(0,1.1) Un5(0,0) Un6(0,-1.1) Un7(1.1,1.1) Un8(1.1,0) Un9(1.1,-1.1)
F.SilkS:
  region: -2.61,2.61 -2.85,2.94 -2.37,2.94
  lines w0.254: -2.61,-2.135 -2.61,-2.61 -2.135,-2.61 ; -2.61,2.135 -2.61,2.37 ; -2.31,2.61 -2.135,2.61 ; 2.135,-2.61 2.61,-2.61 2.61,-2.135 ; 2.135,2.61 2.61,2.61 2.61,2.135
Top Component Center:
  lines w0.127: -0.127,0 0.127,0 -0.127,0 ; 0,-0.127 0,0.127 0,-0.127
Top Assembly:
  region: 2.5,-2.5 -2.5,-2.5 -2.5,1.5 -1.5,2.5 2.5,2.5
Top Courtyard:
  lines w0.254: -3.13,-2.13 -3.13,2.13 -2.75,2.13 -2.75,2.75 -2.13,2.75 -2.13,3.13 2.13,3.13 2.13,2.75 2.75,2.75 2.75,2.13 3.13,2.13 3.13,-2.13 2.75,-2.13 2.75,-2.75 2.13,-2.75 2.13,-3.13 -2.13,-3.13 -2.13,-2.75 -2.75,-2.75 -2.75,-2.13 -3.13,-2.13
Top Designator:
  text ".Designator" at -3.43,-0.344 h1.52
3D body "QFN-32-1EP_5x5mm_P0.5mm_EP3.3x3.3mm.step": height 0.87, standoff 0, extent -2.5,-2.5 2.5,2.5

## QFN-32-1EP_5x5mm_P0.5mm_EP3.6x3.6mm [mm] "QFN-32-1EP_5x5mm_P0.5mm_EP3.6x3.6mm"
pads (42):
  rrect25% 0.8x0.25 smd: 1(-2.45,1.75) 2(-2.45,1.25) 3(-2.45,0.75) 4(-2.45,0.25) 5(-2.45,-0.25) 6(-2.45,-0.75) 7(-2.45,-1.25) 8(-2.45,-1.75) 17(2.45,-1.75) 18(2.45,-1.25) 19(2.45,-0.75) 20(2.45,-0.25) 21(2.45,0.25) 22(2.45,0.75) 23(2.45,1.25) 24(2.45,1.75)
  rrect25% 0.25x0.8 smd: 9(-1.75,-2.45) 10(-1.25,-2.45) 11(-0.75,-2.45) 12(-0.25,-2.45) 13(0.25,-2.45) 14(0.75,-2.45) 15(1.25,-2.45) 16(1.75,-2.45) 25(1.75,2.45) 26(1.25,2.45) 27(0.75,2.45) 28(0.25,2.45) 29(-0.25,2.45) 30(-0.75,2.45) 31(-1.25,2.45) 32(-1.75,2.45)
  rect 3.6x3.6 smd: 33(0,0)
  rrect25% 0.97x0.97 on Top Paste: Un1(-1.2,1.2) Un2(-1.2,0) Un3(-1.2,-1.2) Un4(0,1.2) Un5(0,0) Un6(0,-1.2) Un7(1.2,1.2) Un8(1.2,0) Un9(1.2,-1.2)
F.SilkS:
  region: -2.61,2.61 -2.85,2.94 -2.37,2.94
  lines w0.254: -2.61,-2.135 -2.61,-2.61 -2.135,-2.61 ; -2.61,2.135 -2.61,2.37 ; -2.31,2.61 -2.135,2.61 ; 2.135,-2.61 2.61,-2.61 2.61,-2.135 ; 2.135,2.61 2.61,2.61 2.61,2.135
Top Component Center:
  lines w0.127: -0.127,0 0.127,0 -0.127,0 ; 0,-0.127 0,0.127 0,-0.127
Top Assembly:
  region: 2.5,-2.5 -2.5,-2.5 -2.5,1.5 -1.5,2.5 2.5,2.5
Top Courtyard:
  lines w0.254: -3.1,-2.13 -3.1,2.13 -2.75,2.13 -2.75,2.75 -2.13,2.75 -2.13,3.1 2.13,3.1 2.13,2.75 2.75,2.75 2.75,2.13 3.1,2.13 3.1,-2.13 2.75,-2.13 2.75,-2.75 2.13,-2.75 2.13,-3.1 -2.13,-3.1 -2.13,-2.75 -2.75,-2.75 -2.75,-2.13 -3.1,-2.13
Top Designator:
  text ".Designator" at -3.43,-0.344 h1.52
3D body "QFN-32-1EP_5x5mm_P0.5mm_EP3.7x3.7mm.step": height 0.85, standoff 0, extent -2.5,-2.5 2.5,2.5